# Altium schematic symbol library B4B-PH-SM4-TB(LF)(SN).SchLib: 1 symbol
Pins are listed as number, name and electrical type; pins without a type are passive.

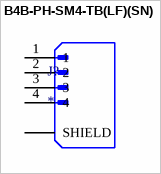
[diagram p0: symbol B4B-PH-SM4-TB(LF)(SN)]

## B4B-PH-SM4-TB(LF)(SN)
designator J?
Connector Header Surface Mount 4 position 0.079 (2.00mm); MF: JST Sales; MP: B4B-PH-SM4-TB(LF)(SN); SnapEDA_Link: https://www.snapeda.com/parts/B4B-PH-SM4-TB(LF)(SN)/JST+Sales+America+Inc./view-part/?ref=snap; Package: NON STANDARD-4 JST; Value: *; Check_prices: https://www.snapeda.com/parts/B4B-PH-SM4-TB(LF)(SN)/JST+Sales+America+Inc./view-part/?ref=eda
footprint JST_B4B-PH-SM4-TB(LF)(SN)
pins: 1, 2, 3, 4, SH1 SHIELD, SH2 SHIELD